# Altium footprint library AudioMoth 1.1.PCBLIB: 193 footprints (part 10 of 13)
Each footprint in its own frame and in the unit in brackets; x right, y up, seen from the top. Pads: shape width x height; smd on the part's side, far side on the other; paste and mask are expansions set on the pad; w line width, h text height; cw(c..) or ccw(c..) is an arc to the next point about the centre after c.
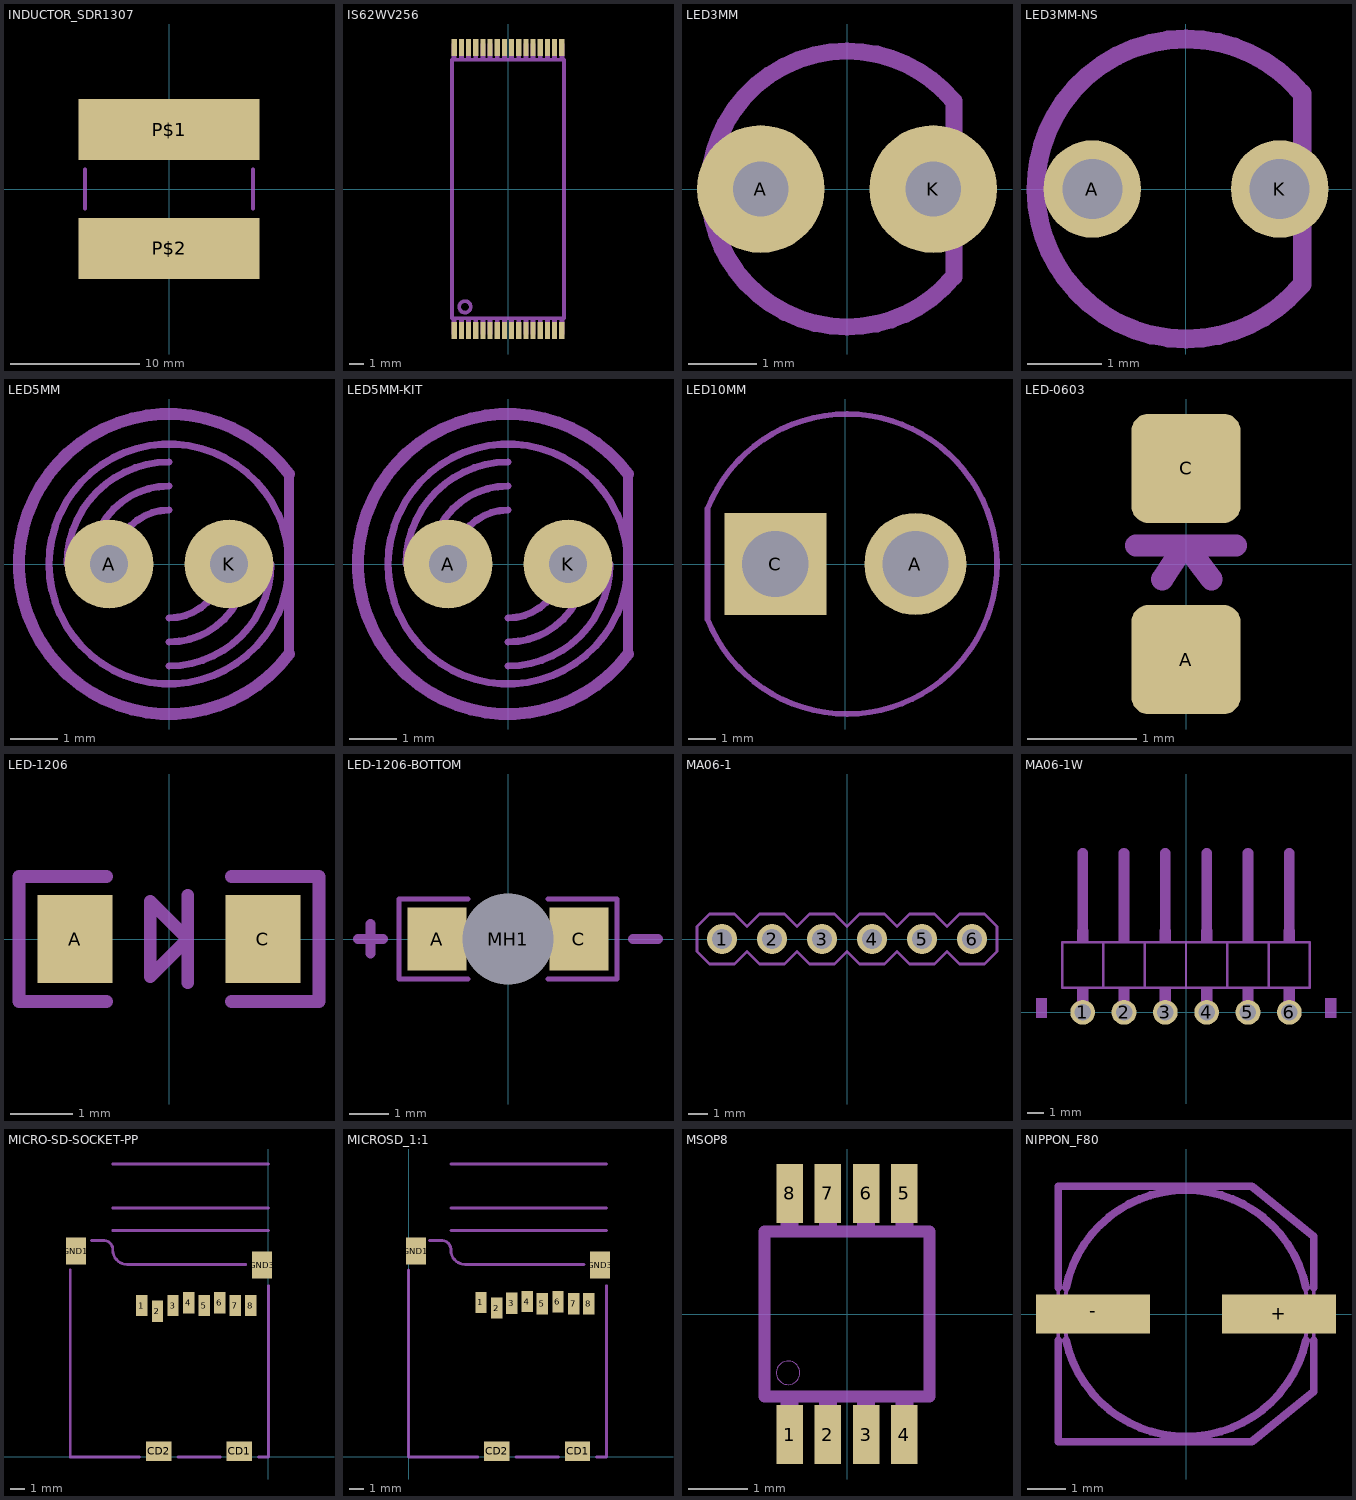
[diagram p9: the footprints below, top view; thin cyan lines are the x and y axes]

## INDUCTOR_SDR1307 [mm]
pads (2):
  rect 14x4.75 smd: P$1(0,4.6) P$2(0,-4.6)
tPlace:
  lines w0.305: -6.5,-1.5 -6.5,1.5 ; 6.5,-1.5 6.5,1.5

## IS62WV256 [mm]
pads (32):
  rect 0.36x1.2 smd: 1(-3.75,-9.85) 2(-3.25,-9.85) 3(-2.75,-9.85) 4(-2.25,-9.85) 5(-1.75,-9.85) 6(-1.25,-9.85) 7(-0.75,-9.85) 8(-0.25,-9.85) 9(0.25,-9.85) 10(0.75,-9.85) 11(1.25,-9.85) 12(1.75,-9.85) 13(2.25,-9.85) 14(2.75,-9.85) 15(3.25,-9.85) 16(3.75,-9.85) 17(3.75,9.85) 18(3.25,9.85) 19(2.75,9.85) 20(2.25,9.85) 21(1.75,9.85) 22(1.25,9.85) 23(0.75,9.85) 24(0.25,9.85) 25(-0.25,9.85) 26(-0.75,9.85) 27(-1.25,9.85) 28(-1.75,9.85) 29(-2.25,9.85) 30(-2.75,9.85) 31(-3.25,9.85) 32(-3.75,9.85)
tDocu:
  region: -3.902,-10.11 -3.902,-9.043 -3.598,-9.043 -3.598,-10.11
  region: -3.402,-10.11 -3.402,-9.043 -3.098,-9.043 -3.098,-10.11
  region: -2.902,-10.11 -2.902,-9.043 -2.598,-9.043 -2.598,-10.11
  region: -2.402,-10.11 -2.402,-9.043 -2.098,-9.043 -2.098,-10.11
  region: -1.902,-10.11 -1.902,-9.043 -1.598,-9.043 -1.598,-10.11
  region: -1.402,-10.11 -1.402,-9.043 -1.098,-9.043 -1.098,-10.11
  region: -0.902,-10.11 -0.902,-9.043 -0.598,-9.043 -0.598,-10.11
  region: -0.402,-10.11 -0.402,-9.043 -0.098,-9.043 -0.098,-10.11
  region: 0.098,-10.11 0.098,-9.043 0.402,-9.043 0.402,-10.11
  region: 0.598,-10.11 0.598,-9.043 0.902,-9.043 0.902,-10.11
  region: 1.098,-10.11 1.098,-9.043 1.402,-9.043 1.402,-10.11
  region: 1.598,-10.11 1.598,-9.043 1.902,-9.043 1.902,-10.11
  region: 2.098,-10.11 2.098,-9.043 2.402,-9.043 2.402,-10.11
  region: 2.598,-10.11 2.598,-9.043 2.902,-9.043 2.902,-10.11
  region: 3.098,-10.11 3.098,-9.043 3.402,-9.043 3.402,-10.11
  region: 3.598,-10.11 3.598,-9.043 3.902,-9.043 3.902,-10.11
  region: 3.598,9.043 3.598,10.11 3.902,10.11 3.902,9.043
  region: 3.098,9.043 3.098,10.11 3.402,10.11 3.402,9.043
  region: 2.598,9.043 2.598,10.11 2.902,10.11 2.902,9.043
  region: 2.098,9.043 2.098,10.11 2.402,10.11 2.402,9.043
  region: 1.598,9.043 1.598,10.11 1.902,10.11 1.902,9.043
  region: 1.098,9.043 1.098,10.11 1.402,10.11 1.402,9.043
  region: 0.598,9.043 0.598,10.11 0.902,10.11 0.902,9.043
  region: 0.098,9.043 0.098,10.11 0.402,10.11 0.402,9.043
  region: -0.402,9.043 -0.402,10.11 -0.098,10.11 -0.098,9.043
  region: -0.902,9.043 -0.902,10.11 -0.598,10.11 -0.598,9.043
  region: -1.402,9.043 -1.402,10.11 -1.098,10.11 -1.098,9.043
  region: -1.902,9.043 -1.902,10.11 -1.598,10.11 -1.598,9.043
  region: -2.402,9.043 -2.402,10.11 -2.098,10.11 -2.098,9.043
  region: -2.902,9.043 -2.902,10.11 -2.598,10.11 -2.598,9.043
  region: -3.402,9.043 -3.402,10.11 -3.098,10.11 -3.098,9.043
  region: -3.902,9.043 -3.902,10.11 -3.598,10.11 -3.598,9.043
tPlace:
  circle w0.254: c-3,-8.21 r0.4
  lines w0.254: -3.9,-9 -3.9,9 3.9,9 3.9,-9 -3.9,-9

## LED3MM [mil]
pads (2):
  round 74 hole 32: A(-50,0) K(50,0)
tDocu:
  lines w10: -70.44,37.93 ccw(c0,0.01) -80,0 ccw(c0,0) -68.13,-41.93 ; 62,-50 62,50
tPlace:
  lines w10: -70.59,37.65 cw(c0,0) 0,80 cw(c0.01,0) 61.46,51.22 ; -69.46,-39.69 ccw(c0,0) 0,-80 ccw(c0,0) 61.07,-51.68 ; 62,-51 62,-33 ; 62,31 62,51

## LED3MM-NS [mil]
pads (2):
  round 52 hole 32: A(-50,0) K(50,0)
tDocu:
  lines w10: -70.59,37.65 cw(c0,0) 0,80 cw(c0.01,0) 61.46,51.22 ; -70.44,37.93 ccw(c0,0.01) -80,0 ccw(c0,0) -68.13,-41.93 ; -69.46,-39.69 ccw(c0,0) 0,-80 ccw(c0,0) 61.07,-51.68 ; 62,-51 62,-50 62,-33 62,51

## LED5MM [mil]
pads (2):
  round 74 hole 32: A(-50,0) K(50,0)
tDocu:
  lines w6: -85,0 cw(c0,0) 0,85 ; -65,0 cw(c0,0) 0,65 ; -45,0 cw(c0,0) 0,45 ; 0,-85 ccw(c0,0) 85,0 ; 0,-65 ccw(c0,0) 65,0 ; 0,-45 ccw(c0,0) 45,0
tPlace:
  circle w6: c0,0 r100
  lines w8: 100,-75 100,75
  lines w10: 100,-75 cw(c0,0) 100,75

## LED5MM-KIT [mil]
pads (2):
  round 74 hole 32: A(-50,0) K(50,0)
Top Solder:
  region: -50,-17.5 -53.4,-17.58 -59.75,-15.12 -64.67,-10.43 -67.42,-4.2 -67.5,-0.8 -67.59,2.77 -65.02,9.44 -60.1,14.61 -53.57,17.51 -50,17.6 -46.48,17.54 -40.02,14.74 -35.12,9.67 -32.54,3.12 -32.6,-0.4 -32.63,-3.83 -35.31,-10.15 -40.21,-14.96 -46.57,-17.53 -50,-17.5
  region: 50,-17.5 46.6,-17.58 40.25,-15.12 35.33,-10.43 32.58,-4.2 32.5,-0.8 32.41,2.77 34.98,9.44 39.9,14.61 46.43,17.51 50,17.6 53.52,17.54 59.98,14.74 64.88,9.67 67.46,3.12 67.4,-0.4 67.37,-3.83 64.69,-10.15 59.79,-14.96 53.43,-17.53 50,-17.5
Bottom Solder:
  region: -49.9,-37.5 -53.55,-37.55 -60.74,-36.22 -67.53,-33.51 -73.66,-29.54 -78.9,-24.44 -83.04,-18.42 -85.93,-11.7 -87.45,-4.55 -87.5,-0.9 -87.54,2.84 -86.17,10.19 -83.4,17.13 -79.32,23.39 -74.09,28.74 -67.93,32.97 -61.05,35.91 -53.74,37.46 -50,37.5 -46.26,37.45 -38.95,35.88 -32.09,32.92 -25.93,28.68 -20.72,23.31 -16.66,17.04 -13.9,10.09 -12.55,2.74 -12.6,-1 -12.64,-4.63 -14.13,-11.75 -16.99,-18.43 -21.09,-24.44 -26.29,-29.52 -32.37,-33.49 -39.12,-36.2 -46.27,-37.54 -49.9,-37.5
  region: 50.1,-37.5 46.45,-37.55 39.26,-36.22 32.47,-33.51 26.34,-29.54 21.1,-24.44 16.96,-18.42 14.07,-11.7 12.55,-4.55 12.5,-0.9 12.46,2.84 13.83,10.19 16.6,17.13 20.68,23.39 25.91,28.74 32.07,32.97 38.95,35.91 46.26,37.46 50,37.5 53.74,37.45 61.05,35.88 67.91,32.92 74.07,28.68 79.28,23.31 83.34,17.04 86.1,10.09 87.45,2.74 87.4,-1 87.36,-4.63 85.87,-11.75 83.01,-18.43 78.91,-24.44 73.71,-29.52 67.63,-33.49 60.88,-36.2 53.73,-37.54 50.1,-37.5
tDocu:
  lines w6: -85,0 cw(c0,0) 0,85 ; -65,0 cw(c0,0) 0,65 ; -45,0 cw(c0,0) 0,45 ; 0,-85 ccw(c0,0) 85,0 ; 0,-65 ccw(c0,0) 65,0 ; 0,-45 ccw(c0,0) 45,0
tPlace:
  circle w6: c0,0 r100
  lines w8: 100,-75 100,75
  lines w10: 100,-75 cw(c0,0) 100,75

## LED10MM [mm]
pads (2):
  round 3.7 hole 2.4: A(2.54,0)
  rect 3.7x3.7 / inner round 3.418 / far side rect 3.7x3.7 hole 2.4: C(-2.54,0)
tDocu:
  text "L" at 2.159,2.54 h1.57
  text "S" at -2.921,2.54 h1.57
tPlace:
  lines w0.203: -5,-2 ccw(c0.059,0) -5,2 -5,-2

## LED-0603 [mm]
pads (2):
  rrect30% 1x1 smd: A(0,-0.877) C(0,0.877)
tPlace:
  lines w0.203: -0.46,0.17 0,0.17 ; -0.218,-0.14 -0.025,0.155 ; 0.234,-0.14 0,0.17 ; 0.46,0.17 0,0.17

## LED-1206 [mm]
pads (2):
  rect 1.2x1.4 smd: A(-1.5,0) C(1.5,0)
tPlace:
  lines w0.203: -1,-1 -2.4,-1 -2.4,1 -1,1 ; 0.3,-0.7 0.3,0 ; 0.3,0.7 0.3,0 ; 1,-1 2.4,-1 2.4,1 1,1 ; 0.3,0 -0.3,0.6 -0.3,-0.6 0.3,0

## LED-1206-BOTTOM [mm]
pads (3):
  rect 1.5x1.6 smd: A(-1.8,0) C(1.8,0)
  round 2.3 hole 2.3 unplated: MH1(0,0)
tDocu:
  region: -0.75,-0.75 -0.75,0.75 0.75,0.75 0.75,-0.75
  region: 1.1,-0.5 1.1,0.5 1.6,0.5 1.6,0.25 1.561,0.246 1.489,0.216 1.434,0.161 1.404,0.089 1.4,0.05 1.4,-0.05 1.404,-0.089 1.434,-0.161 1.489,-0.216 1.561,-0.246 1.6,-0.25 1.6,-0.5
  region: -1.1,0.5 -1.1,-0.5 -1.6,-0.5 -1.6,-0.25 -1.561,-0.246 -1.489,-0.216 -1.434,-0.161 -1.404,-0.089 -1.4,-0.05 -1.4,0.05 -1.404,0.089 -1.434,0.161 -1.489,0.216 -1.561,0.246 -1.6,0.25 -1.6,0.5
tPlace:
  lines w0.127: -1.016,-1.016 -2.769,-1.016 -2.769,1.016 -1.016,1.016 ; 1.016,-1.016 2.769,-1.016 2.769,1.016 1.016,1.016 ; 3.175,0 3.353,0
  lines w0.254: -3.81,0 -3.175,0 ; -3.49,0.376 -3.487,0.373 -3.487,-0.371 ; -3.487,-0.368 -3.487,0.356 ; 3.175,0 3.81,0
Reference:
  lines w0.127: -2.4,0 -1.6,0 ; -2,-0.4 -2,0.4 ; -1.27,0 -0.381,0 ; 0.254,-0.635 0.254,0 ; 0.254,0.635 0.254,0 ; 1.27,0 0.254,0 ; 1.6,0 2.4,0 ; -0.381,0 -0.381,0.635 0.254,0 ; -0.381,0 -0.381,-0.635 0.254,0

## MA06-1 [mil]
pads (6):
  round 60 hole 40: 1(-250,0) 2(-150,0) 3(-50,0) 4(50,0) 5(150,0) 6(250,0)
tDocu:
  region: -160,-10 -160,10 -140,10 -140,-10
  region: -260,-10 -260,10 -240,10 -240,-10
  region: -60,-10 -60,10 -40,10 -40,-10
  region: 140,-10 140,10 160,10 160,-10
  region: 40,-10 40,10 60,10 60,-10
  region: 240,-10 240,10 260,10 260,-10
tPlace:
  lines w6: -300,-25 -300,25 -275,50 -225,50 -200,25 -175,50 -125,50 -100,25 -75,50 -25,50 0,25 25,50 75,50 100,25 125,50 175,50 200,25 225,50 275,50 300,25 300,-25 275,-50 225,-50 200,-25 175,-50 125,-50 100,-25 75,-50 25,-50 0,-25 -25,-50 -75,-50 -100,-25 -125,-50 -175,-50 -200,-25 -225,-50 -275,-50 -300,-25
  text "1" at -275,-115 h77.5
  text "6" at 225,65 h77.5

## MA06-1W [mil]
pads (6):
  round 60 hole 40: 1(-250,0) 2(-150,0) 3(-50,0) 4(50,0) 5(150,0) 6(250,0)
tDocu:
  region: 337,-13 337,34 363,34 363,-13
  region: 237,-13 237,34 263,34 263,-13
  region: 137,-13 137,34 163,34 163,-13
  region: 37,-13 37,34 63,34 63,-13
  region: -63,-13 -63,34 -37,34 -37,-13
  region: -163,-13 -163,34 -137,34 -137,-13
  region: -263,-13 -263,34 -237,34 -237,-13
  region: -363,-13 -363,34 -337,34 -337,-13
tPlace:
  region: 237,170 237,200 263,200 263,170
  region: -263,170 -263,200 -237,200 -237,170
  region: -163,170 -163,200 -137,200 -137,170
  region: -63,170 -63,200 -37,200 -37,170
  region: 37,170 37,200 63,200 63,170
  region: 137,170 137,200 163,200 163,170
  region: 237,34 237,60 263,60 263,34
  region: 137,34 137,60 163,60 163,34
  region: 37,34 37,60 63,60 63,34
  region: -63,34 -63,60 -37,60 -37,34
  region: -163,34 -163,60 -137,60 -137,34
  region: -263,34 -263,60 -237,60 -237,34
  lines w6: -200,60 -200,170 ; -200,60 -300,60 -300,170 -200,170 ; -200,60 -100,60 ; -200,170 -100,170 ; -100,60 0,60 ; -100,60 -100,170 ; -100,170 0,170 ; 0,60 100,60 ; 0,60 0,170 ; 0,170 100,170 ; 100,60 200,60 ; 100,60 100,170 ; 100,170 200,170 ; 200,60 300,60 300,170 200,170 ; 200,60 200,170
  lines w26: -250,200 -250,385 ; -150,200 -150,385 ; -50,200 -50,385 ; 50,200 50,385 ; 150,200 150,385 ; 250,200 250,385
  text "1" at -225,80 h77.5
  text "2" at -125,80 h77.5
  text "3" at -25,80 h77.5
  text "4" at 75,80 h77.5
  text "5" at 175,80 h77.5
  text "6" at 275,80 h77.5

## MICRO-SD-SOCKET-PP [mil]
pads (12):
  rect 31.5x59.06 smd: 1(-351.97,421.26) 2(-308.66,405.51) 3(-265.35,421.26) 4(-222.05,429.13) 5(-178.74,421.26) 6(-135.43,429.13) 7(-92.13,421.26) 8(-48.82,421.26)
  rect 70.87x55.12 smd: CD1(-80.71,15.75) CD2(-305.12,15.75)
  rect 55.12x74.8 smd: GND1(-535.43,572.83) GND3(-17.72,533.46)
tDocu:
  lines w8: -433.07,629.92 0,629.92 ; -433.07,692.91 0,692.91 ; -433.07,814.96 0,814.96
tPlace:
  lines w8: -551.18,519.68 -551.18,0 -358.27,0 ; -492.13,602.36 -460.63,602.36 cw(c-458.66,576.77) -433.07,574.8 ccw(c-392.72,575.78) -393.7,535.43 -62.99,535.43 ; -251.97,0 -133.86,0 ; -27.56,0 0,0 0,476.38

## MICROSD_1:1 [mil]
pads (12):
  rect 31.5x59.06 smd: 1(200.62,429.89) 2(244.79,414.15) 3(286.37,427.3) 4(329.39,432.37) 5(370.9,426.3) 6(414.93,432.01) 7(458.59,425.94) 8(500.82,425.94)
  rect 70.87x55.12 smd: CD1(469.29,15.75) CD2(244.88,15.75)
  rect 55.12x74.8 smd: GND1(19.57,572.83) GND3(532.28,533.46)
tDocu:
  lines w8: 116.93,629.92 550,629.92 ; 116.93,692.91 550,692.91 ; 116.93,814.96 550,814.96
tPlace:
  lines w8: -1.18,519.68 -1.18,0 191.73,0 ; 57.87,602.36 89.37,602.36 cw(c91.34,576.77) 116.93,574.8 ccw(c157.28,575.78) 156.3,535.43 487.01,535.43 ; 298.03,0 416.14,0 ; 522.44,0 550,0 550,476.38

## MSOP8 [mm]
pads (8):
  rect 0.45x1 smd: 1(-0.975,-2.05) 2(-0.325,-2.05) 3(0.325,-2.05) 4(0.975,-2.05) 5(0.975,2.05) 6(0.325,2.05) 7(-0.325,2.05) 8(-0.975,2.05)
tDocu:
  region: -1.125,-2.45 -1.125,-1.5 -0.826,-1.5 -0.826,-2.45
  region: -0.475,-2.45 -0.475,-1.5 -0.175,-1.5 -0.175,-2.45
  region: 0.175,-2.45 0.175,-1.5 0.475,-1.5 0.475,-2.45
  region: 0.825,-2.45 0.825,-1.5 1.125,-1.5 1.125,-2.45
  region: 0.826,1.5 0.826,2.45 1.125,2.45 1.125,1.5
  region: 0.175,1.5 0.175,2.45 0.475,2.45 0.475,1.5
  region: -0.475,1.5 -0.475,2.45 -0.175,2.45 -0.175,1.5
  region: -1.125,1.5 -1.125,2.45 -0.825,2.45 -0.825,1.5
tPlace:
  circle w0: c-1,-1 r0.2
  lines w0.203: -1.4,-1.4 1.4,-1.4 1.4,1.4 -1.4,1.4 -1.4,-1.4

## NIPPON_F80 [mm]
pads (2):
  rect 2.95x1 smd: +(2.4,0) -(-2.4,0)
tDocu:
  circle w0.102: c0,0 r3.15
  lines w0.102: -3.3,-3.3 1.7,-3.3 3.3,-2 3.3,2 1.7,3.3 -3.3,3.3 -3.3,-3.3
tPlace:
  lines w0.203: -3.3,-0.685 -3.3,-3.3 1.7,-3.3 3.3,-2 3.3,-0.685 ; -3.3,0.685 -3.3,3.3 1.7,3.3 3.3,2 3.3,0.685 ; -3.1,-0.685 ccw(c0,0.009) 3.1,-0.685 ; -3.1,0.685 cw(c0,0.04) 3.1,0.685